# Altium schematic symbol library Inductor.SchLib: 326 symbols (part 1 of 7)
Pins are listed as number, name and electrical type; pins without a type are passive.

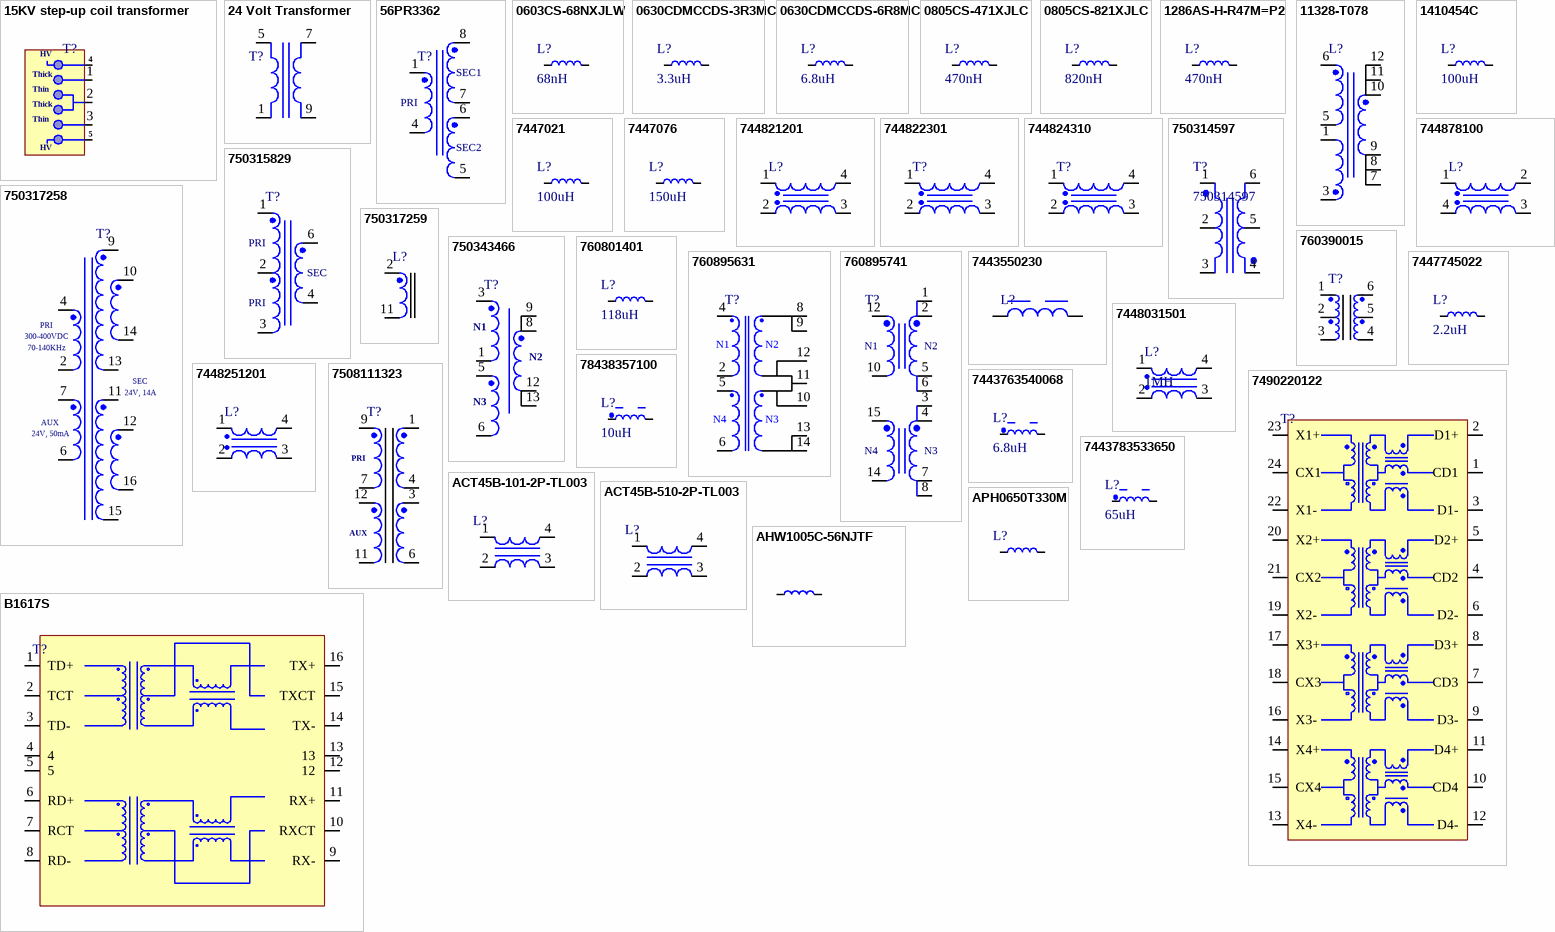
[diagram p0: symbols 15KV step-up coil transformer to B1617S]

## 15KV step-up coil transformer
designator T?
15KV Arc Ignition High Voltage Inverter Step Up Boost Coil Transformer Pulse Ignition 1.4x1.4x0.7cm Lighter Accessories; Manufacturer: Aideepen; Manufacturer Part Number: 15KV step-up coil transformer; Item Type: Transformer; ComponentLink1Description: Aliexpress; ComponentLink1URL: https://vi.aliexpress.com/item/1005006061113490.html
footprint 15KV step-up coil transformer
pins: 1, 2, 3
text: HV; 4; Thick; Thin; 5

## 24 Volt Transformer
designator T?
EI41 6W 6VA AC 220V To AC 9V 12V 18V 24V Mini Sealed Plug In PCB Board 4P 7P 9P 2+2 2+5 4+5 Pin Power Encapsulated Transformer; Manufacturer: Custom; Manufacturer Part Number: EI41 6W; Item Type: Tranformer; Package: Custom; ComponentLink1Description: LCSC; ComponentLink1URL: https://vi.aliexpress.com/item/1005004852504417.html?spm=a2g0o.detail.0.0.2e2bW50JW50JvB&gps-id=pcDetailTopMoreOtherSeller&scm=1007.40050.354490.0&scm_id=1007.40050.354490.0&scm-url=1007.40050.354490.0&pvid=b6bd52d8-3991-4a90-8d35-7ea6b531d3b9&_t=gps-id:pcDetailTopMoreOtherSeller,scm-url:1007.40050.354490.0,pvid:b6bd52d8-3991-4a90-8d35-7ea6b531d3b9,tpp_buckets:668%232846%238108%231977&pdp_npi=4%40dis%21USD%2110.00%219.2%21%21%2110.00%21%21%402101c71a16975406234165745e0bc7%2112000030749125505%21rec%21PK%214250221299%21AB
footprint 24 Volt Transformer
pins: 1, 5, 7, 9

## 56PR3362
designator T?
Gate Drive Transformer; Manufacturer: Vitec; Manufacturer Part Number: 56P3362; Package: Custom; LCSC Part Number: -; Item Type: Transformer; ComponentLink1Description: LCSC; ComponentLink1URL: *
footprint 56PR3362
pins: 1, 4, 5, 6, 7, 8
text: SEC1; PRI; SEC2

## 0603CS-68NXJLW
designator L?, comment 68nH
Ind Chip Wirewound 68nH 5% 200MHz 37Q-Factor Ceramic 600mA 0603; Manufacturer: Coilcraft; Manufacturer Part Number: 0603CS-68NXJLW; DC Resistance (DCR): 340mR; Q Factor: 21; Self Resonant Frequency: 1.7GHz; Item Type: Inductor; Supplier 1: Mouser; RoHS: Yes; Category: Fixed Inductors; Stock 1: 3257; Pricing 1: 1=0.96000, 10=0.95200, 50=0.95200, 100=0.95200, 1000=0.36200, 10000=0.30900 (USD); Case/Package: 0603; Weight: 7.1E-05oz; Core Material: Ceramic; Min Operating Temperature: -40°C; Max Operating Temperature: 125°C; Packaging: Tape and Reel; Tolerance: 5%; Inductance: 68nH; Max DC Current: 600mA; Termination: SMD/SMT; Test Frequency: 200MHz; Series: 0603CS; Length: 1.8mm; Width: 1.12mm; Height: 1.02mm; Lead Free: Contains Lead; RoHS Compliant: Yes; ComponentLink1URL: http://www.mouser.com/ds/2/597/0603cs-270694.pdf?src-supplier=Mouser; ComponentLink1Description: http://www.mouser.com/ds/2/597/0603cs-270694.pdf?src-supplier=Mouser; Supplier Part Number 1: 994-0603CS-68NXJLW
footprint IND-0603 (1608 Metric) (0.063" L x 0.032" W (1.60mm x 0.80mm))
pins: 1, 2

## 0630CDMCCDS-3R3MC
designator L?, comment 3.3uH
FIXED IND 3.3UH 8.4A 22MOHM SMD; Manufacturer: Sumida; Manufacturer Part Number: 0630CDMCCDS-3R3MC; Item Type: Inductor; Core Material: Metal; Saturation Current: 11.4A; Shielding: Shielded; DC Resistance (DCR): 22mR; Test Frequency: 100kHz; Tolerance: 20%; Supplier: Digikey; LCSC Part Number: C879414; RoHS: Yes; Stock: 66218; Pricing: 1=0.6, 10=0.51, 25=0.4632, 50=0.4354, 100=0.3614, 250=0.33356, 500=0.32624 (USD); Mounting Technology: Surface Mount; Case/Package: Nonstandard; Min Operating Temperature: -55°C; Max Operating Temperature: 125°C; Packaging: Tape and Reel; Value: 3.3uH; Current Rating: 8.4A; Series: 0630CDMC/DS; Length: 0.276inch; Width: 0.26inch; Height - Seated (Max): 0.118inch; RoHS Compliant: Yes; ComponentLink1URL: http://products.sumida.com/products/pdf/0630CDMCDDS.pdf?src-supplier=Digikey; ComponentLink1Description: http://products.sumida.com/products/pdf/0630CDMCDDS.pdf?src-supplier=Digikey; ComponentLink2URL: https://products.sumida.com/products/pdf/0630CDMCDDS.pdf?src-supplier=Digikey; ComponentLink2Description: https://products.sumida.com/products/pdf/0630CDMCDDS.pdf?src-supplier=Digikey; ComponentLink3URL: https://datasheet.octopart.com/0630CDMCCDS-3R3MC-Sumida-datasheet-111071315.pdf?src-supplier=Future+Electronics; ComponentLink3Description: https://datasheet.octopart.com/0630CDMCCDS-3R3MC-Sumida-datasheet-111071315.pdf?src-supplier=Future+Electronics
footprint 0630CDMCCDS-3R3MC
pins: 1, 2

## 0630CDMCCDS-6R8MC
designator L?, comment 6.8uH
FIXED IND 6.8UH 5A 48 MOHM SMD; Manufacturer: Sumida; Manufacturer Part Number: 0630CDMCCDS-6R8MC; Core Material: Metal; Saturation Current: 6.3A; Shielding: Shielded; DC Resistance (DCR): 48mR; Test Frequency: 100kHz; Tolerance: 20%; Item Type: Inductor; Supplier 1: Digi-Key; Stock 1: 1582; Pricing 1: 1=0.97, 10=0.845, 25=0.7848, 50=0.6642, 100=0.6038, 250=0.56752, 500=0.50716 (USD); Mount: Surface Mount; Case/Package: Nonstandard; Min Operating Temperature: -55°C; Max Operating Temperature: 125°C; Packaging: Tape and Reel; Inductance: 6.8uH; Current Rating: 5A; Length: 0.276inch; Width: 0.26inch; Height - Seated (Max): 0.118inch; RoHS Compliant: Yes; ComponentLink1URL: http://products.sumida.com/products/pdf/0630CDMCDDS.pdf?src-supplier=Digi-Key; ComponentLink1Description: http://products.sumida.com/products/pdf/0630CDMCDDS.pdf?src-supplier=Digi-Key; Supplier Part Number 1: 308-2467-1-ND; LCSC Part Number: C167295
footprint 0630CDMCCDS_6R8MC
pins: 1, 2

## 0805CS-471XJLC
designator L?, comment 470nH
Ind Chip Wirewound 470nH 5% 50MHz 33Q-Factor Ceramic 250mA 0805; Manufacturer: Coilcraft; Manufacturer Part Number: 0805CS-471XJLC; Self Resonant Frequency: 375MHz; Q Factor: 33; DC Resistance (DCR): 1.76R; Item Type: Inductor; Supplier 1: Mouser; RoHS: Yes; Category: Fixed Inductors; Stock 1: 13057; Pricing 1: 1=0.96000, 10=0.95200, 50=0.95200, 100=0.95200, 1000=0.36200, 10000=0.30900 (USD); Case/Package: 0805; Weight: 0.000194oz; Core Material: Ceramic; Case Code (Imperial): 0805; Min Operating Temperature: -40°C; Max Operating Temperature: 125°C; Tolerance: 5%; Packaging: Tape and Reel; Inductance: 470nH; Max DC Current: 250mA; Termination: SMD/SMT; Test Frequency: 50MHz; Series: 0805CS; DC Current: 250mA; Length: 2.29mm; Width: 1.73mm; Height: 1.52mm; Depth: 1.73mm; Radiation Hardening: No; Lead Free: Contains Lead; RoHS Compliant: Yes; Military Standard: Not; ComponentLink1URL: https://www.verical.com/server-webapp/html/getDatasheet?partID=491697&src-supplier=Verical; ComponentLink1Description: https://www.verical.com/server-webapp/html/getDatasheet?partID=491697&src-supplier=Verical; ComponentLink2URL: http://www.mouser.com/ds/2/597/0805cs-270614.pdf?src-supplier=Mouser; ComponentLink2Description: http://www.mouser.com/ds/2/597/0805cs-270614.pdf?src-supplier=Mouser; Supplier Part Number 1: 994-0805CS-471XJLC
footprint Ind-0805 (Inductor 0805)
pins: 1, 2

## 0805CS-821XJLC
designator L?, comment 820nH
Ind Chip Wirewound 820nH 5% 25MHz 23Q-Factor Ceramic 180mA 0805; Manufacturer: Coilcraft; Manufacturer Part Number: 0805CS-821XJLC; Self Resonant Frequency: 310MHz; DC Resistance (DCR): 2.35R; Q Factor: 23; Item Type: Inductor; Supplier 1: Mouser; RoHS: Yes; Category: Fixed Inductors; Stock 1: 7834; Pricing 1: 1=0.96000, 10=0.95200, 50=0.95200, 100=0.95200, 200=0.71100, 500=0.53000, 1000=0.36200, 2000=0.30900, 10000=0.30900 (USD); Case/Package: 0805; Core Material: Ceramic; Weight: 0.000194oz; Min Operating Temperature: -40°C; Max Operating Temperature: 125°C; Packaging: Tape and Reel; Tolerance: 5%; Inductance: 820nH; Max DC Current: 180mA; Termination: SMD/SMT; Test Frequency: 25MHz; Series: 0805CS; Length: 2.29mm; Width: 1.73mm; Height: 1.52mm; Lead Free: Contains Lead; RoHS Compliant: Yes; ComponentLink1URL: http://www.mouser.com/ds/2/597/0805cs-270614.pdf?src-supplier=Mouser; ComponentLink1Description: http://www.mouser.com/ds/2/597/0805cs-270614.pdf?src-supplier=Mouser; Supplier Part Number 1: 994-0805CS-821XJLC
footprint Ind-0805 (Inductor 0805)
pins: 1, 2

## 1286AS-H-R47M=P2
designator L?, comment 470nH
FIXED IND 470NH 3.4A 52 MOHM SMD; Manufacturer: Murata; Manufacturer Part Number: 1286AS-H-R47M=P2; Core Material: Ferrite; Shielding: Shielded; DC Resistance (DCR): 52mR; Test Frequency: 1MHz; Max DC Current: 3.8A; Tolerance: 20%; Item Type: Inductor; Supplier: Digi-Key; Supplier Part Number: 490-10606-1-ND; RoHS: Yes; Category: Fixed Inductors; Stock: 12493; Pricing: 1=0.39, 10=0.348, 25=0.3048, 50=0.2612, 100=0.2394, 250=0.21764, 500=0.2046, 1000=0.15671 (USD); Mounting Technology: Surface Mount; Case/Package: 0806; Case Code (Metric): 2016; Case Code (Imperial): 0806; Min Operating Temperature: -40°C; Max Operating Temperature: 85°C; Value: 470nH; Packaging: Cut Tape; Current Rating: 3.4A; Series: DFE201612C; Length: 0.079inch; Width: 0.063inch; Height - Seated (Max): 0.047inch; Depth: 1.6mm; RoHS Compliant: Yes; ComponentLink1URL: http://www.farnell.com/datasheets/2021974.pdf?src-supplier=Farnell; ComponentLink1Description: http://www.farnell.com/datasheets/2021974.pdf?src-supplier=Farnell; ComponentLink2URL: http://www.toko.co.jp/products/pdf/inductors/dfe201612c.pdf?src-supplier=Avnet; ComponentLink2Description: http://www.toko.co.jp/products/pdf/inductors/dfe201612c.pdf?src-supplier=Avnet; ComponentLink3URL: http://search.murata.co.jp/Ceramy/image/img/P02/J(E)TE243A-0010_DFE201612C_reference.pdf?src-supplier=Digi-Key; ComponentLink3Description: http://search.murata.co.jp/Ceramy/image/img/P02/J(E)TE243A-0010_DFE201612C_reference.pdf?src-supplier=Digi-Key; ComponentLink4URL: http://www.toko.co.jp/products/pdf/inductors/dfe201612c.pdf?src-supplier=Digi-Key; ComponentLink4Description: http://www.toko.co.jp/products/pdf/inductors/dfe201612c.pdf?src-supplier=Digi-Key; LCSC Part Number: C160957
footprint IND-0806
pins: 1, 2

## 11328-T078
designator L?
Power Transformers Flyback Transformer for LT8316; Manufacturer: Sumida; Manufacturer Part Number: 11328-T078; Supplier: Mouser; Supplier Part Number: 851-11328-T078; RoHS: Yes; Item Type: Transformer; Pricing: 1=8.39, 10=6.59, 50=6.41, 100=5.22, 1000=5.02, 10000=4.94 (USD)
footprint 11328-T078
pins: 1, 3, 5, 6, 7, 8, 9, 10, 11, 12

## 1410454C
designator L?, comment 100uH
FIXED IND 100UH 5.4A 46 MOHM TH; Manufacturer: Murata; Manufacturer Part Number: 1410454C; Item Type: Fixed Inductor; Supplier: Digikey; Supplier Part Number: 811-1345-ND; RoHS: Yes; Stock: 662; Pricing: 1=2.49, 5=2.48, 10=2.46, 25=2.44, 50=2.38, 100=2.26, 250=2.11, 500=1.96, 1000=1.85001 (USD); ComponentLink1URL: https://datasheet.ciiva.com/1054/kmp-1400-1054704.pdf?src-supplier=Digikey; ComponentLink1Description: https://datasheet.ciiva.com/1054/kmp-1400-1054704.pdf?src-supplier=Digikey; ComponentLink2URL: https://datasheet.ciiva.com/8035/1697186-8035695.pdf?src-supplier=Element14; ComponentLink2Description: https://datasheet.ciiva.com/8035/1697186-8035695.pdf?src-supplier=Element14; ComponentLink3URL: https://datasheet.ciiva.com/1128/1697186-1128025.pdf?src-supplier=Element14; ComponentLink3Description: https://datasheet.ciiva.com/1128/1697186-1128025.pdf?src-supplier=Element14; ComponentLink4URL: https://datasheet.ciiva.com/3077/kmp-1400-3077038.pdf?src-supplier=Avnet; ComponentLink4Description: https://datasheet.ciiva.com/3077/kmp-1400-3077038.pdf?src-supplier=Avnet; ComponentLink5URL: https://datasheet.ciiva.com/4957/kmp-1400-38440-4957718.pdf?src-supplier=Mouser; ComponentLink5Description: https://datasheet.ciiva.com/4957/kmp-1400-38440-4957718.pdf?src-supplier=Mouser
footprint 1410454C
pins: 1, 2

## 7447021
designator L?, comment 100uH
FIXED IND 100UH 2A 80 MOHM TH; Manufacturer: Wurth Electronics; Manufacturer Part Number: 7447021; Item Type: Inductors; Supplier: Mouser; Supplier Part Number: 710-7447021; RoHS: Yes; Stock: 1392; Pricing: 1=1.93, 10=1.83, 50=1.71, 100=1.61, 1000=1.46, 10000=1.46 (USD); ComponentLink1URL: https://datasheet.ciiva.com/11796/0900766b804e2e89-11796539.pdf?src-supplier=Rs; ComponentLink1Description: https://datasheet.ciiva.com/11796/0900766b804e2e89-11796539.pdf?src-supplier=Rs; ComponentLink2URL: https://datasheet.ciiva.com/6693/7447021-6693538.pdf?src-supplier=Digikey; ComponentLink2Description: https://datasheet.ciiva.com/6693/7447021-6693538.pdf?src-supplier=Digikey; ComponentLink3URL: https://datasheet.ciiva.com/14101/pk7447021-data-de-14101850.pdf?src-supplier=Distrelec; ComponentLink3Description: https://datasheet.ciiva.com/14101/pk7447021-data-de-14101850.pdf?src-supplier=Distrelec; ComponentLink4URL: https://datasheet.ciiva.com/7695/7447021-7695676.pdf?src-supplier=Element14; ComponentLink4Description: https://datasheet.ciiva.com/7695/7447021-7695676.pdf?src-supplier=Element14; ComponentLink5URL: https://datasheet.ciiva.com/48691/001087627-da-01-ml-we-fi-funkentstoerdrossel-7447021-de-en-48691575.pdf?src-supplier=Conrad; ComponentLink5Description: https://datasheet.ciiva.com/48691/001087627-da-01-ml-we-fi-funkentstoerdrossel-7447021-de-en-48691575.pdf?src-supplier=Conrad
footprint 7447021
pins: 1, 2

## 7447076
designator L?, comment 150uH
FIXED IND 150UH 5A 45 MOHM TH; Manufacturer: Wurth Electronics; Manufacturer Part Number: 7447076; Item Type: Inductors; Supplier: Mouser; RoHS: Yes; Stock: 602; Pricing: 1=5.45, 10=5.19, 50=4.84, 100=4.57, 1000=4.12, 10000=4.12 (USD); ComponentLink1URL: https://datasheet.ciiva.com/11796/0900766b804e2e81-11796524.pdf?src-supplier=Rs; ComponentLink1Description: https://datasheet.ciiva.com/11796/0900766b804e2e81-11796524.pdf?src-supplier=Rs; ComponentLink2URL: https://datasheet.ciiva.com/6697/7447076-6697107.pdf?src-supplier=Digikey; ComponentLink2Description: https://datasheet.ciiva.com/6697/7447076-6697107.pdf?src-supplier=Digikey; ComponentLink3URL: https://datasheet.ciiva.com/7695/7447076-7695687.pdf?src-supplier=Element14; ComponentLink3Description: https://datasheet.ciiva.com/7695/7447076-7695687.pdf?src-supplier=Element14; Supplier Part Number: 710-7447076
footprint 7447076
pins: 1, 2

## 744821201
designator L?
CMC 1MH 2A 2LN TH; Manufacturer: Wurth Electronics; Manufacturer Part Number: 744821201; Item Type: Fixed Inductors; Supplier: Mouser; Supplier Part Number: 710-744821201; RoHS: Yes; Stock: 341; Pricing: 1=3.6, 10=3.33, 50=2.98, 100=2.62, 1000=2.34, 10000=2.34 (USD); ComponentLink1URL: https://datasheet.ciiva.com/4952/744821201-87450-4952378.pdf?src-supplier=Mouser; ComponentLink1Description: https://datasheet.ciiva.com/4952/744821201-87450-4952378.pdf?src-supplier=Mouser; ComponentLink2URL: https://datasheet.ciiva.com/1008/744821201-1008592.pdf?src-supplier=Digikey; ComponentLink2Description: https://datasheet.ciiva.com/1008/744821201-1008592.pdf?src-supplier=Digikey; ComponentLink3URL: https://datasheet.ciiva.com/11796/0900766b804ac268-11796620.pdf?src-supplier=Rs; ComponentLink3Description: https://datasheet.ciiva.com/11796/0900766b804ac268-11796620.pdf?src-supplier=Rs; ComponentLink4URL: https://datasheet.ciiva.com/7211/70377-7211245.pdf?src-supplier=Newark; ComponentLink4Description: https://datasheet.ciiva.com/7211/70377-7211245.pdf?src-supplier=Newark; ComponentLink5URL: https://datasheet.ciiva.com/7892/1736513-7892972.pdf?src-supplier=Element14; ComponentLink5Description: https://datasheet.ciiva.com/7892/1736513-7892972.pdf?src-supplier=Element14; ComponentLink6URL: https://datasheet.ciiva.com/14124/to744821201-data-de-14124987.pdf?src-supplier=Distrelec; ComponentLink6Description: https://datasheet.ciiva.com/14124/to744821201-data-de-14124987.pdf?src-supplier=Distrelec
footprint 744821201
pins: 1, 2, 3, 4

## 744822301
designator T?
CMC 1MH 3A 2LN TH; Manufacturer: Wurth Electronics; Manufacturer Part Number: 744822301; Item Type: Inductor; Supplier: Digikey; Supplier Part Number: 732-1439-ND; RoHS: Yes; Stock: 1589; Pricing: 1=4.57, 10=4.5, 50=3.57, 140=3.41, 280=3.1 (USD); ComponentLink1URL: https://datasheet.ciiva.com/4952/744822301-91864-4952415.pdf?src-supplier=Mouser; ComponentLink1Description: https://datasheet.ciiva.com/4952/744822301-91864-4952415.pdf?src-supplier=Mouser; ComponentLink2URL: https://datasheet.ciiva.com/11796/0900766b804ac271-11796688.pdf?src-supplier=Rs; ComponentLink2Description: https://datasheet.ciiva.com/11796/0900766b804ac271-11796688.pdf?src-supplier=Rs; ComponentLink3URL: https://datasheet.ciiva.com/7211/70388-7211253.pdf?src-supplier=Newark; ComponentLink3Description: https://datasheet.ciiva.com/7211/70388-7211253.pdf?src-supplier=Newark; ComponentLink4URL: https://datasheet.ciiva.com/7754/1736520-7754735.pdf?src-supplier=Element14; ComponentLink4Description: https://datasheet.ciiva.com/7754/1736520-7754735.pdf?src-supplier=Element14; ComponentLink5URL: https://datasheet.ciiva.com/6216/744822301-6216281.pdf?src-supplier=Digikey; ComponentLink5Description: https://datasheet.ciiva.com/6216/744822301-6216281.pdf?src-supplier=Digikey
footprint 744822301
pins: 1, 2, 3, 4

## 744824310
designator T?
CMC 10MH 3A 2LN TH; Manufacturer: Wurth Electronics; Manufacturer Part Number: 744824310; Item Type: Common Mode Chokes; Tolerance: 30%; Test Frequency: 10kHz; Number of Lines: 2; DC Resistance (DCR): 105mR; Supplier: Digikey; Supplier Part Number: 732-1452-ND; RoHS: Yes; Stock: 278; Pricing: 1=5.63, 10=5.54, 100=4.39, 250=4.2, 500=3.82 (USD); Mounting Technology: Through Hole,Radial; Case/Package: L; Pins: 4; Min Operating Temperature: -40°C; Max Operating Temperature: 125°C; Current Rating: 3A; Packaging: Bulk; Value: 10mH; Max DC Current: 3A; Termination: Radial; Series: WE-CMB; Inductance Tolerance: 30%; Package Quantity: 200; Current: 3A; Length: 27.5mm; Width: 18.5mm; Height: 33mm; Lead Pitch: 10mm; Depth: 18.5mm; Reach SVHC Compliant: No; RoHS Compliant: Yes; Lead Free: Lead Free; ComponentLink1URL: https://datasheet.ciiva.com/11796/0900766b804acf58-11796710.pdf?src-supplier=Rs; ComponentLink1Description: https://datasheet.ciiva.com/11796/0900766b804acf58-11796710.pdf?src-supplier=Rs; ComponentLink2URL: https://datasheet.ciiva.com/4952/744824310-39306-4952431.pdf?src-supplier=Mouser; ComponentLink2Description: https://datasheet.ciiva.com/4952/744824310-39306-4952431.pdf?src-supplier=Mouser; ComponentLink3URL: https://datasheet.ciiva.com/6214/744824310-6214810.pdf?src-supplier=Digikey; ComponentLink3Description: https://datasheet.ciiva.com/6214/744824310-6214810.pdf?src-supplier=Digikey; ComponentLink4URL: https://datasheet.ciiva.com/7211/70411-7211262.pdf?src-supplier=Newark; ComponentLink4Description: https://datasheet.ciiva.com/7211/70411-7211262.pdf?src-supplier=Newark; ComponentLink5URL: https://datasheet.ciiva.com/7754/1736534-7754741.pdf?src-supplier=Element14; ComponentLink5Description: https://datasheet.ciiva.com/7754/1736534-7754741.pdf?src-supplier=Element14; ComponentLink6URL: https://datasheet.ciiva.com/48690/001088035-da-01-ml-we-cmb-stromkomp-netzdrossel-74482-de-en-48690603.pdf?src-supplier=Conrad; ComponentLink6Description: https://datasheet.ciiva.com/48690/001088035-da-01-ml-we-cmb-stromkomp-netzdrossel-74482-de-en-48690603.pdf?src-supplier=Conrad
footprint 744824310
pins: 1, 2, 3, 4

## 744878100
designator L?
INDUCT ARRAY 2 COIL 10UH SMD; Manufacturer: Wurth Electronics; Manufacturer Part Number: 744878100; Item Type: Inductors; Core Material: Ferrite; Inductance Tolerance: 20%; Self Resonant Frequency: 30MHz; Voltage Rating (DC): 80V; Value: 10H; Shielding: Shielded; Number of Coils: 2; DC Resistance (DCR) - Parallel: 150mR; Max DC Current: 1A; Inductance - Series: 40uH; Supplier: Digikey; Supplier Part Number: 732-2304-1-ND; RoHS: Yes; Stock: 7740; Pricing: 1=2.53, 10=2.41, 50=2.24, 100=2.06, 500=1.89 (USD); Mounting Technology: Surface Mount; Case/Package: Nonstandard; Pins: 4; Min Operating Temperature: -40°C; Max Operating Temperature: 125°C; Package Quantity: 1; Tolerance: 20%; Packaging: Tape and Reel; Termination: SMD/SMT; RMS Current (Irms): 1A; Inductance - Parallel: 10uH; Series: WE-DD; Length: 7.3mm; Width: 7.3mm; Height: 4mm; Depth: 7.3mm; Lead Free: Lead Free; RoHS Compliant: Yes; Reach SVHC Compliant: Unknown; ComponentLink1URL: https://datasheet.ciiva.com/6171/1243322-6171216.pdf?src-supplier=Farnell; ComponentLink1Description: https://datasheet.ciiva.com/6171/1243322-6171216.pdf?src-supplier=Farnell; ComponentLink2URL: https://datasheet.ciiva.com/4954/744878100-47110-4954758.pdf?src-supplier=Mouser; ComponentLink2Description: https://datasheet.ciiva.com/4954/744878100-47110-4954758.pdf?src-supplier=Mouser; ComponentLink3URL: https://datasheet.ciiva.com/1036/744878100-1036050.pdf?src-supplier=Digikey; ComponentLink3Description: https://datasheet.ciiva.com/1036/744878100-1036050.pdf?src-supplier=Digikey; ComponentLink4URL: https://datasheet.ciiva.com/11803/0900766b80fecf13-11803188.pdf?src-supplier=Rs; ComponentLink4Description: https://datasheet.ciiva.com/11803/0900766b80fecf13-11803188.pdf?src-supplier=Rs; ComponentLink5URL: https://datasheet.ciiva.com/1036/744878100-1036051.pdf?src-supplier=Digikey; ComponentLink5Description: https://datasheet.ciiva.com/1036/744878100-1036051.pdf?src-supplier=Digikey; ComponentLink6URL: https://datasheet.ciiva.com/1036/744878100-1036052.pdf?src-supplier=Digikey; ComponentLink6Description: https://datasheet.ciiva.com/1036/744878100-1036052.pdf?src-supplier=Digikey
footprint 744878100
pins: 1, 2, 3, 4

## 750314597
designator T?
XFRMR ISOL BUCK DC/DC CONV SMD; Manufacturer: Wurth Electronics Midcom; Frequency: 150kHz; Supplier 1: Digi-Key; Manufacturer Part Number: 750314597; RoHS: Yes; Category: Power Supply Modules; Stock 1: 1132; Pricing 1: 1=3.57000, 10=3.30600, 50=3.00500, 100=2.73200 (USD); Mount: Surface Mount; Min Operating Temperature: -40°C; Max Operating Temperature: 125°C; Packaging: Tape and Reel; RoHS Compliant: No; ComponentLink1URL: http://www.mouser.com/ds/2/445/750314597-773587.pdf?src-supplier=Mouser; ComponentLink1Description: http://www.mouser.com/ds/2/445/750314597-773587.pdf?src-supplier=Mouser; ComponentLink2URL: https://katalog.we-online.de/ctm/datasheet/750314597.pdf?src-supplier=Digi-Key; ComponentLink2Description: https://katalog.we-online.de/ctm/datasheet/750314597.pdf?src-supplier=Digi-Key; Supplier Part Number 1: 1297-1165-1-ND
footprint 750314597
pins: 1 PRI_1, 2 NC, 3 PRI_2, 4 SEC_1, 5 NC, 6 SEC_2

## 750315829
designator T?
MID-FLYLT LT8303 150uH 3.1W Power Transformers; Manufacturer: Wurth Electronics; Manufacturer Part Number: 750315829; Frequency: 200kHz; Supplier: Digikey; RoHS: Yes; Item Type: Transformer; Stock: 1323; Pricing: 1=2.66, 10=2.131, 25=1.7312, 50=1.6868, 100=1.6424 (USD); Mounting Technology: Surface Mount; Min Operating Temperature: -40°C; Max Operating Temperature: 125°C; Packaging: Cut Tape; Series: *; RoHS Compliant: Yes; ComponentLink1URL: https://katalog.we-online.com/ctm/datasheet/750315829.pdf?src-supplier=Digikey; ComponentLink1Description: https://katalog.we-online.com/ctm/datasheet/750315829.pdf?src-supplier=Digikey
footprint 750315829
pins: 1, 2, 3, 4, 6
text: PRI; SEC

## 750317258
designator T?
Manufacturer: Würth Elektronik; Manufacturer Part Number: 750317258; Item Type: Transformer; Package: Custom; LCSC Part Number: -; ComponentLink1Description: LCSC; ComponentLink1URL: *
footprint 750317258
pins: 2, 4, 6, 7, 9, 10, 11, 12, 13, 14, 15, 16
text: PRI; 300-400VDC; 70-140KHz; SEC; 24V, 14A; AUX; 24V, 50mA

## 750317259
designator L?
Manufacturer: Würth Elektronik; Manufacturer Part Number: 750317259; Item Type: Inductor; Package: Custom; LCSC Part Number: -; ComponentLink1Description: LCSC; ComponentLink1URL: *
footprint 750317259 (SMD, 12-Leads, Body 31.75x31.75mm)
pins: 2, 11

## 750343466
designator T?
XFMR FLYBACK AC/DC CONV 280UH TH; Manufacturer: Wurth Electronics; Manufacturer Part Number: 750343466; Item Type: Transformer; Supplier: Digikey; Supplier Part Number: 1297-750343466-ND; RoHS: Yes; Stock: 112; Pricing: 1=7.36, 10=6.646, 25=6.3768, 70=6.08471, 140=5.89457, 280=5.70964, 490=5.56402, 980=5.38821 (USD); RoHS Compliant: Yes
footprint 750343466
pins: 1, 3, 5, 6, 8, 9, 12, 13
text: N1; N2; N3

## 760390015
designator T?
TRANSFORMER 475UH SMD; Manufacturer: Wurth Electronics; Manufacturer Part Number: 760390015; Frequency: 10kHz; Current Rating: 150mA; Isolation Voltage: 2.5kV; Supplier: Rs; Supplier Part Number: 1828986P; RoHS: Yes; Category: Transformers; Stock: 435; Pricing: 25=1.438, 100=1.36, 250=1.312, 500=1.226 (GBP); Mounting Technology: Surface Mount; Case/Package: SMD/SMT; Min Operating Temperature: -40°C; Max Operating Temperature: 125°C; Package Quantity: 1; Packaging: Tape and Reel; Termination: SMD/SMT; Value: 475uH; Series: WE-PP; Max DC Current: 150mA; Length: 10.05mm; Width: 10.05mm; Height: 4.19mm; Height - Seated (Max): 4.19mm; RoHS Compliant: Yes; ComponentLink1URL: https://datasheet.ciiva.com/12335/760390015-221218-12335392.pdf?src-supplier=Mouser; ComponentLink1Description: https://datasheet.ciiva.com/12335/760390015-221218-12335392.pdf?src-supplier=Mouser; Item Type: TRANSFORMER
footprint 760390015
pins: 1, 2, 3, 4, 5, 6

## 760801401
designator L?, comment 118uH
FIXED IND 118UH 13.9A 0.022OHM; Manufacturer: Wurth Electronics; Manufacturer Part Number: 760801401; Item Type: Inductors; Supplier: Digikey; Supplier Part Number: 732-760801401-ND; RoHS: No; Stock: 36; Pricing: 1=18.9, 5=17.01, 10=15.12, 20=14.175, 100=13.2301 (USD)
footprint 760801401
pins: 1, 2

## 760895631
designator T?
XFMR RES CONV AC/DC 500UH TH; Manufacturer: Wurth Electronics; Manufacturer Part Number: 760895631; Item Type: Transformer; Current Rating: 16.7A; Power Rating: 200W; Shielding: Unshielded; Frequency: 120kHz; Output Voltage: 12V; Supplier: Digikey; Supplier Part Number: 732-5065-ND; RoHS: Yes; Stock: 19; Pricing: 1=18.84, 10=18.057, 50=16.928, 100=15.235, 500=13.54202 (USD); Mounting Technology: Through Hole; Min Operating Temperature: -40°C; Max Operating Temperature: 125°C; Package Quantity: 15; Output Current: 16.7A; Termination: Solder; Value: 500uH; Packaging: Tray; Series: WE-LLCR; Length: 44mm; Width: 36mm; Height: 30mm; RoHS Compliant: Yes; ComponentLink1URL: https://datasheet.ciiva.com/24142/760895631-270540-24142135.pdf?src-supplier=Mouser; ComponentLink1Description: https://datasheet.ciiva.com/24142/760895631-270540-24142135.pdf?src-supplier=Mouser; ComponentLink2URL: https://datasheet.ciiva.com/29632/760895631-29632478.pdf?src-supplier=Digikey; ComponentLink2Description: https://datasheet.ciiva.com/29632/760895631-29632478.pdf?src-supplier=Digikey
footprint 760895631
pins: 2, 4, 5, 6, 8, 9, 10, 11, 12, 13, 14
text: N1; N2; N4; N3

## 760895741
designator T?
XFMR RES CONV AC/DC 400UH TH; Manufacturer: Wurth Electronics; Manufacturer Part Number: 760895741; Item Type: Transformer; Frequency: 120kHz; Current Rating: 10.4A; Power Rating: 250W; Shielding: Unshielded; Output Voltage: 24V; Supplier: Digikey; Supplier Part Number: 732-5069-ND; RoHS: Yes; Stock: 7; Pricing: 1=22.74, 10=21.792, 50=20.43, 100=18.3881, 500=15.66304 (USD); Mounting Technology: Through Hole; Min Operating Temperature: -40°C; Max Operating Temperature: 125°C; Package Quantity: 20; Output Current: 10.4A; Packaging: Tray; Termination: Solder; Value: 400uH; Series: WE-LLCR; Length: 48mm; Width: 35mm; Height: 27.5mm; RoHS Compliant: Yes; ComponentLink1URL: https://datasheet.ciiva.com/24142/760895741-270531-24142074.pdf?src-supplier=Mouser; ComponentLink1Description: https://datasheet.ciiva.com/24142/760895741-270531-24142074.pdf?src-supplier=Mouser; ComponentLink2URL: https://datasheet.ciiva.com/29632/760895741-29632482.pdf?src-supplier=Digikey; ComponentLink2Description: https://datasheet.ciiva.com/29632/760895741-29632482.pdf?src-supplier=Digikey
footprint 760895741
pins: 1, 2, 3, 4, 5, 6, 7, 8, 10, 12, 14, 15
text: N1; N2; N4; N3

## 7443550230
designator L?
FIXED IND 2.3UH 17.5A 3.7MOHM SM; Manufacturer: Wurth Electronics; Manufacturer Part Number: 7443550230; Item Type: Inductors; Supplier: Digikey; Supplier Part Number: 732-7443550230CT-ND; RoHS: Yes; Stock: 2613; Pricing: 1=3.48, 10=3.41, 50=3.15, 100=3.02, 200=2.82 (USD); ComponentLink1URL: https://datasheet.ciiva.com/4954/7443550230-82185-4954542.pdf?src-supplier=Mouser; ComponentLink1Description: https://datasheet.ciiva.com/4954/7443550230-82185-4954542.pdf?src-supplier=Mouser; ComponentLink2URL: https://datasheet.ciiva.com/11801/0900766b80f886e1-11801808.pdf?src-supplier=Rs; ComponentLink2Description: https://datasheet.ciiva.com/11801/0900766b80f886e1-11801808.pdf?src-supplier=Rs; ComponentLink3URL: https://datasheet.ciiva.com/7765/1735881-7765096.pdf?src-supplier=Element14; ComponentLink3Description: https://datasheet.ciiva.com/7765/1735881-7765096.pdf?src-supplier=Element14; ComponentLink4URL: https://datasheet.ciiva.com/6705/7443550230-6705035.pdf?src-supplier=Digikey; ComponentLink4Description: https://datasheet.ciiva.com/6705/7443550230-6705035.pdf?src-supplier=Digikey; ComponentLink5URL: https://datasheet.ciiva.com/6705/7443550230-6705036.pdf?src-supplier=Digikey; ComponentLink5Description: https://datasheet.ciiva.com/6705/7443550230-6705036.pdf?src-supplier=Digikey
footprint 7443550230
pins: 1, 2

## 7447745022
designator L?, comment 2.2uH
FIXED IND 2.2UH 3.6A 36 MOHM SMD; Manufacturer: Wurth Electronics; Manufacturer Part Number: 7447745022; Item Type: Inductors; Supplier: Digikey; RoHS: Yes; Stock: 1399; Pricing: 1=1.87, 10=1.791, 50=1.612, 100=1.492, 500=1.433, 1000=1.313 (USD); ComponentLink1URL: https://datasheet.ciiva.com/4954/7447745022-70534-4954819.pdf?src-supplier=Mouser; ComponentLink1Description: https://datasheet.ciiva.com/4954/7447745022-70534-4954819.pdf?src-supplier=Mouser; ComponentLink2URL: https://datasheet.ciiva.com/30489/0900766b811bf6b7-30489497.pdf?src-supplier=Rs; ComponentLink2Description: https://datasheet.ciiva.com/30489/0900766b811bf6b7-30489497.pdf?src-supplier=Rs; ComponentLink3URL: https://datasheet.ciiva.com/7892/1736408-7892891.pdf?src-supplier=Element14; ComponentLink3Description: https://datasheet.ciiva.com/7892/1736408-7892891.pdf?src-supplier=Element14; ComponentLink4URL: https://datasheet.ciiva.com/6700/7447745022-6700388.pdf?src-supplier=Digikey; ComponentLink4Description: https://datasheet.ciiva.com/6700/7447745022-6700388.pdf?src-supplier=Digikey; ComponentLink5URL: https://datasheet.ciiva.com/6700/7447745022-6700390.pdf?src-supplier=Digikey; ComponentLink5Description: https://datasheet.ciiva.com/6700/7447745022-6700390.pdf?src-supplier=Digikey
footprint 7447745022
pins: 1, 2

## 7448031501
designator L?, comment 1MH
CMC 1MH 15A 2LN TH; Manufacturer: Wurth Electronics; Manufacturer Part Number: 7448031501; Number of Lines: 2; Voltage Rating (AC): 250V; Shielding: Unshielded; Tolerance: 50%; Test Frequency: 10kHz; Item Type: Inductor; Supplier: Mouser; Supplier Part Number: 710-7448031501; RoHS: Yes; Category: Common Mode Chokes; Stock: 2629; Pricing: 1=12.9, 10=12.9, 50=11.34, 100=9.67, 1000=8.72, 10000=8.72 (USD); Mounting Technology: Through Hole; Case/Package: 300; Min Operating Temperature: -40°C; Max Operating Temperature: 125°C; Current Rating: 15A; Package Quantity: 90; Packaging: Bulk; Max Current Rating: 15A; Value: 1mH; Termination: Through Hole; Max DC Current: 15A; Series: WE-CMBNC; Length: 23mm; Width: 17mm; Height: 25mm; RoHS Compliant: Yes; Reach SVHC Compliant: Unknown; ComponentLink1URL: https://datasheet.ciiva.com/46423/1832949-46423388.pdf?src-supplier=Element14; ComponentLink1Description: https://datasheet.ciiva.com/46423/1832949-46423388.pdf?src-supplier=Element14
footprint 7448031501
pins: 1, 2, 3, 4

## 7448251201
designator L?
CMC 1MH 12A 2LN TH; Manufacturer: Wurth Electronics; Manufacturer Part Number: 7448251201; Item Type: Inductors; Supplier: Digikey; Supplier Part Number: 732-1454-ND; RoHS: Yes; Stock: 1202; Pricing: 1=6.33, 10=6.23, 50=4.94, 175=4.73006, 350=4.6368 (USD); ComponentLink1URL: https://datasheet.ciiva.com/6216/7448251201-6216302.pdf?src-supplier=Digikey; ComponentLink1Description: https://datasheet.ciiva.com/6216/7448251201-6216302.pdf?src-supplier=Digikey; ComponentLink2URL: https://datasheet.ciiva.com/4952/7448251201-46375-4952324.pdf?src-supplier=Mouser; ComponentLink2Description: https://datasheet.ciiva.com/4952/7448251201-46375-4952324.pdf?src-supplier=Mouser; ComponentLink3URL: https://datasheet.ciiva.com/11796/0900766b804acf5b-11796661.pdf?src-supplier=Rs; ComponentLink3Description: https://datasheet.ciiva.com/11796/0900766b804acf5b-11796661.pdf?src-supplier=Rs; ComponentLink4URL: https://datasheet.ciiva.com/7754/1736539-7754744.pdf?src-supplier=Element14; ComponentLink4Description: https://datasheet.ciiva.com/7754/1736539-7754744.pdf?src-supplier=Element14; ComponentLink5URL: https://datasheet.ciiva.com/7211/70416-7211268.pdf?src-supplier=Newark; ComponentLink5Description: https://datasheet.ciiva.com/7211/70416-7211268.pdf?src-supplier=Newark; ComponentLink6URL: https://datasheet.ciiva.com/14124/ue7448251201-de-14124967.pdf?src-supplier=Distrelec; ComponentLink6Description: https://datasheet.ciiva.com/14124/ue7448251201-de-14124967.pdf?src-supplier=Distrelec
footprint 7448251201
pins: 1, 2, 3, 4

## 7490220122
designator T?
PULSE XFMR 1CT:1CT TX 1CT:1CT RX; Manufacturer: Wurth Electronics; Manufacturer Part Number: 7490220122; Item Type: Transformers; Value: 350uH; Turns Ratio: 1:1; Supplier: Digikey; Supplier Part Number: 732-10731-1-ND; RoHS: Yes; Stock: 1691; Pricing: 1=6.97, 10=6.731, 50=6.321, 100=5.951 (USD); Mounting Technology: Surface Mount; Min Operating Temperature: -40°C; Max Operating Temperature: 85°C; Packaging: Cut Tape; Series: WE-LAN; RoHS Compliant: Yes; ComponentLink1URL: http://www.farnell.com/datasheets/2616617.pdf?src-supplier=Farnell; ComponentLink1Description: http://www.farnell.com/datasheets/2616617.pdf?src-supplier=Farnell; ComponentLink2URL: http://www.farnell.com/datasheets/2616617.pdf?src-supplier=Newark; ComponentLink2Description: http://www.farnell.com/datasheets/2616617.pdf?src-supplier=Newark; ComponentLink3URL: https://katalog.we-online.de/pbs/datasheet/7490220122.pdf?src-supplier=Digikey; ComponentLink3Description: https://katalog.we-online.de/pbs/datasheet/7490220122.pdf?src-supplier=Digikey
footprint 7490220122
pins: 1 CD1, 2 D1+, 3 D1-, 4 CD2, 5 D2+, 6 D2-, 7 CD3, 8 D3+, 9 D3-, 10 CD4, 11 D4+, 12 D4-, 13 X4-, 14 X4+, 15 CX4, 16 X3-, 17 X3+, 18 CX3, 19 X2-, 20 X2+, 21 CX2, 22 X1-, 23 X1+, 24 CX1

## 7508111323
designator T?
XFMR FLYBACK AC/DC CONV 2MH TH; Manufacturer: Wurth Electronics; Manufacturer Part Number: 7508111323; Item Type: Transformer; Supplier: Digikey; Supplier Part Number: 732-7508111323CT-ND; RoHS: No; Stock: 130; Pricing: 1=6.34, 25=6.3092, 50=5.735 (USD)
footprint 7508111323
pins: 1, 3, 4, 6, 7, 9, 11, 12
text: PRI; AUX

## 78438357100
designator L?, comment 10uH
FIXED IND 10UH 2.7A 110MOHM SMD; Manufacturer: Wurth Elektronik; Manufacturer Part Number: 78438357100; Item Type: Fixed Inductors; DC Resistance (DCR): 100.8mΩ; Value: 10µH; Supplier: DigiKey; Supplier Part Number: 732-11746-1-ND; RoHS: Compliant; Stock: 6444; Pricing: 1=1.93, 10=1.893, 50=1.809, 100=1.667 (USD); Ambient Temperature Range High: 85°C; Ambient Temperature Range Low: -40°C; Current Rating: 2.7A; Height: 3mm; Length: 4mm; Max Operating Temperature: 125°C; Min Operating Temperature: -40°C; Width: 4mm; ComponentLink1URL: https://datasheet.octopart.com:443/78438357100-Wurth-Elektronik-datasheet-168498766.pdf?src-supplier=Wurth+Elektronik; ComponentLink1Description: https://datasheet.octopart.com:443/78438357100-Wurth-Elektronik-datasheet-168498766.pdf?src-supplier=Wurth+Elektronik
footprint 78438357100
pins: 1, 2

## 7443763540068
designator L?, comment 6.8uH
FIXED IND 6.8UH 56.7A 1.2MOHM TH; Manufacturer: Wurth Electronics; Manufacturer Part Number: 7443763540068; Item Type: Inductors; Supplier: Mouser; Supplier Part Number: 710-7443763540068; RoHS: No; Stock: 5; Pricing: 1=20.6, 10=18.63, 50=15.2, 100=15.2, 1000=15.2, 10000=15.2 (USD)
footprint 7443763540068
pins: 1, 2

## 7443783533650
designator L?, comment 65uH
FIXED IND 65UH 17.2A 14.44 MOHM; Manufacturer: Wurth Electronics; Manufacturer Part Number: 7443783533650; Item Type: Inductors; Core Material: Ferrite; Tolerance: 20%; Saturation Current: 26.6A; Shielding: Shielded; DC Resistance (DCR): 14.44mR; Self Resonant Frequency: 4.28MHz; Test Frequency: 100kHz; Supplier: Digikey; Supplier Part Number: 732-13654-ND; RoHS: No; Stock: 42; Pricing: 1=14.95, 3=13.64, 6=12.34, 9=11.04, 18=10.06 (USD); Mounting Technology: Through Hole; Case/Package: Nonstandard; Min Operating Temperature: -40°C; Max Operating Temperature: 125°C; Series: WE-HCFT; Value: 65uH
footprint 7443783533650
pins: 1, 2

## ACT45B-101-2P-TL003
designator L?
CMC 100UH 150MA 2LN 5.8KOHM SMD; Manufacturer: TDK; Manufacturer Part Number: ACT45B-101-2P-TL003; Core Material: Ferrite; Impedance: 5.8kR; Tolerance: 50%; DC Resistance (DCR): 3R; Voltage Rating (DC): 50V; Number of Lines: 2; Inductance Tolerance: -30%; Test Frequency: 10MHz; ESR: 2R; Item Type: Common Mode Filter; Supplier: Avnet; Supplier Part Number: ACT45B-101-2P-TL003; RoHS: Yes; Category: Common Mode Chokes; Stock: 12500; Pricing: 2500=1.0881 (USD); Mounting Technology: Surface Mount; Case/Package: 1812; Pins: 4; Case Code (Imperial): 1812; Weight: 0.000952oz; Min Operating Temperature: -40°C; Max Operating Temperature: 150°C; Value: 100uH; Packaging: Tape and Reel; Current Rating: 150mA; Max DC Current: 150mA; Voltage Rating: 50V; Termination: SMD/SMT; DC Current: 150mA; Series: ACT; Max Current Rating: 150mA; RMS Current (Irms): 150mA; Length: 4.7mm; Width: 3.2mm; Height: 3mm; Depth: 3.4mm; Ratings: AEC-Q200; Radiation Hardening: No; Reach SVHC Compliant: No; Lead Free: Lead Free; RoHS Compliant: Yes; ComponentLink1URL: https://datasheet.ciiva.com/22704/1833202-22704378.pdf?src-supplier=Element14; ComponentLink1Description: https://datasheet.ciiva.com/22704/1833202-22704378.pdf?src-supplier=Element14; ComponentLink2URL: https://datasheet.ciiva.com/16150/e9711-act-16150481.pdf?src-supplier=Onlinecomponents.com; ComponentLink2Description: https://datasheet.ciiva.com/16150/e9711-act-16150481.pdf?src-supplier=Onlinecomponents.com; ComponentLink3URL: https://datasheet.ciiva.com/26936/getdatasheetpartid-327023-26936433.pdf?src-supplier=Verical; ComponentLink3Description: https://datasheet.ciiva.com/26936/getdatasheetpartid-327023-26936433.pdf?src-supplier=Verical; ComponentLink4URL: https://datasheet.ciiva.com/1007/e9711-act-1007936.pdf?src-supplier=Digikey; ComponentLink4Description: https://datasheet.ciiva.com/1007/e9711-act-1007936.pdf?src-supplier=Digikey; ComponentLink5URL: https://datasheet.ciiva.com/7649/1833202-7649181.pdf?src-supplier=Element14; ComponentLink5Description: https://datasheet.ciiva.com/7649/1833202-7649181.pdf?src-supplier=Element14; ComponentLink6URL: https://datasheet.ciiva.com/8498/e9711-act-8498104.pdf?src-supplier=Avnet; ComponentLink6Description: https://datasheet.ciiva.com/8498/e9711-act-8498104.pdf?src-supplier=Avnet; ComponentLink7URL: https://datasheet.ciiva.com/16390/e9711-act-16390646.pdf?src-supplier=Future+Electronics; ComponentLink7Description: https://datasheet.ciiva.com/16390/e9711-act-16390646.pdf?src-supplier=Future+Electronics; ComponentLink8URL: https://datasheet.ciiva.com/31839/15e9711-act-31839430.pdf?src-supplier=Onlinecomponents.com; ComponentLink8Description: https://datasheet.ciiva.com/31839/15e9711-act-31839430.pdf?src-supplier=Onlinecomponents.com; ComponentLink9URL: https://datasheet.ciiva.com/1007/e9711-act-1007935.pdf?src-supplier=Digikey; ComponentLink9Description: https://datasheet.ciiva.com/1007/e9711-act-1007935.pdf?src-supplier=Digikey; ComponentLink10URL: https://datasheet.ciiva.com/1007/e9711-act-1007934.pdf?src-supplier=Digikey; ComponentLink10Description: https://datasheet.ciiva.com/1007/e9711-act-1007934.pdf?src-supplier=Digikey; LCSC Part Number: C88056
footprint ACT45B-101-2P-TL003
pins: 1, 2, 3, 4

## ACT45B-510-2P-TL003
designator L?
CMC 51UH 200MA 2LN 2.8KOHM SMD; Manufacturer: TDK; Manufacturer Part Number: ACT45B-510-2P-TL003; Impedance: 2.8kR; Voltage Rating (DC): 50V; Number of Lines: 2; Tolerance: 50%; DC Resistance (DCR): 1R; Test Frequency: 10MHz; Insulation Resistance: 10MR; Item Type: Common Mode Filter; Supplier: Arrow Electronics; Supplier Part Number: ACT45B-510-2P-TL003; RoHS: Yes; Category: Fixed Inductors; Stock: 390000; Pricing: 2500=0.8915, 5000=0.8612, 10000=0.8526 (USD); Mounting Technology: Surface Mount; Case/Package: 1812; Pins: 4; Case Code (Imperial): 1812; Min Operating Temperature: -40°C; Max Operating Temperature: 150°C; Packaging: Tape and Reel; Value: 51uH; Current Rating: 200mA; Package Quantity: 2000; Voltage Rating: 50V; Max DC Current: 200mA; Termination: SMD/SMT; DC Current: 200mA; Series: ACT; DC Resistance-Max: 1R; Max Current Rating: 200mA; Length: 4.5mm; Width: 3.2mm; Height: 3mm; Depth: 3.4mm; Ratings: AEC-Q200; Radiation Hardening: No; Reach SVHC Compliant: No; Military Standard: Not; RoHS Compliant: Yes; Lead Free: 5697LeadFree; ComponentLink1URL: https://datasheet.ciiva.com/22726/1649098-22726290.pdf?src-supplier=Element14; ComponentLink1Description: https://datasheet.ciiva.com/22726/1649098-22726290.pdf?src-supplier=Element14; ComponentLink2URL: https://datasheet.ciiva.com/1007/e9711-act-1007931.pdf?src-supplier=Digikey; ComponentLink2Description: https://datasheet.ciiva.com/1007/e9711-act-1007931.pdf?src-supplier=Digikey; ComponentLink3URL: https://datasheet.ciiva.com/1007/e9711-act-1007933.pdf?src-supplier=Digikey; ComponentLink3Description: https://datasheet.ciiva.com/1007/e9711-act-1007933.pdf?src-supplier=Digikey; ComponentLink4URL: https://datasheet.ciiva.com/8498/e9711-act-8498633.pdf?src-supplier=Avnet; ComponentLink4Description: https://datasheet.ciiva.com/8498/e9711-act-8498633.pdf?src-supplier=Avnet; ComponentLink5URL: https://datasheet.ciiva.com/7649/1833202-7649183.pdf?src-supplier=Element14; ComponentLink5Description: https://datasheet.ciiva.com/7649/1833202-7649183.pdf?src-supplier=Element14; ComponentLink6URL: https://datasheet.ciiva.com/1007/e9711-act-1007932.pdf?src-supplier=Digikey; ComponentLink6Description: https://datasheet.ciiva.com/1007/e9711-act-1007932.pdf?src-supplier=Digikey; ComponentLink7URL: https://datasheet.ciiva.com/15191/getdatasheetpartid-349822-15191803.pdf?src-supplier=Verical; ComponentLink7Description: https://datasheet.ciiva.com/15191/getdatasheetpartid-349822-15191803.pdf?src-supplier=Verical; LCSC Part Number: C76584
footprint ACT45B-510-2P-TL003
pins: 1, 2, 3, 4

## AHW1005C-56NJTF
designator L?, comment 56nH
100mA 56nH ±5% 0.97Ω 0402 Inductors (SMD) ROHS; Manufacturer: APV; Manufacturer Part Number: AHW1005C-56NJTF; Package: 0402; LCSC Part Number: C6807990; Item Type: Inductor; ComponentLink1Description: LCSC; ComponentLink1URL: https://www.lcsc.com/product-detail/Inductors-SMD_APV-AHW1005C-56NJTF_C6807990.html
footprint IND-0402
pins: 1, 2

## APH0650T330M
designator L?
1.88A 33uH Integrated molded inductor ±20% 2.49A SMD,7x6.6mm Power Inductors ROHS; Manufacturer: APV; Manufacturer Part Number: APH0650T330M; Package: SMD,7x6.6mm; LCSC Part Number: C5349692; Item Type: Inductor
footprint APH0650T330M
pins: 1, 2

## B1617S
designator T?
Single port 1:1 100M POE SMD-16P,12.7x7mm Pulse Transformers(LAN) ROHS; Manufacturer: CND-tek; Manufacturer Part Number: B1617S; Package: SMD-16P,12.7x7mm; LCSC Part Number: C507597; Item Type: Transformer; ComponentLink1Description: LCSC; ComponentLink1URL: https://jlcpcb.com/partdetail/cndtek-B1617S/C507597
footprint B1617S
pins: 1 TD+, 2 TCT, 3 TD-, 4, 5, 6 RD+, 7 RCT, 8 RD-, 9 RX-, 10 RXCT, 11 RX+, 12, 13, 14 TX-, 15 TXCT, 16 TX+

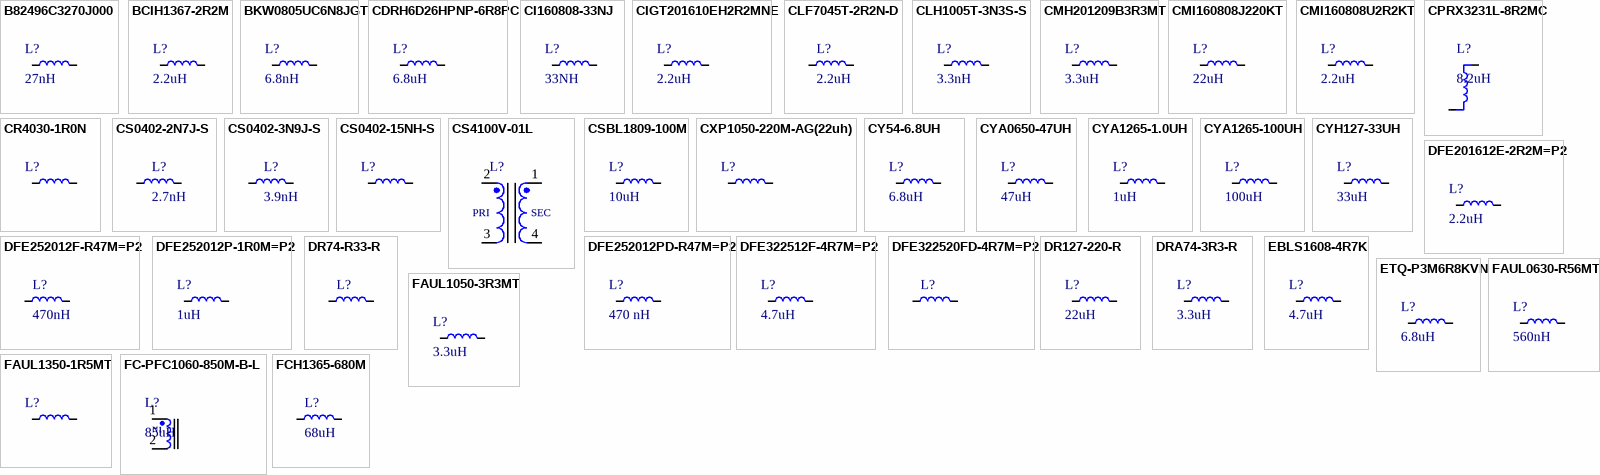
[diagram p1: symbols B82496C3270J000 to FCH1365-680M]

## B82496C3270J000
designator L?, comment 27nH
FIXED IND 27NH 360MA 550MOHM SMD; Manufacturer: TDK EPCOS; Manufacturer Part Number: B82496C3270J000; Item Type: Inductor; Supplier 1: Digikey; RoHS: Yes; Stock 1: 40469; Pricing 1: 1=0.36, 10=0.291, 25=0.2688, 50=0.2464, 100=0.2172, 250=0.21052, 500=0.18814, 1000=0.1523 (USD); ComponentLink1URL: https://datasheet.ciiva.com/22704/78400-22704383.pdf?src-supplier=Element14; ComponentLink1Description: https://datasheet.ciiva.com/22704/78400-22704383.pdf?src-supplier=Element14; ComponentLink2URL: https://datasheet.ciiva.com/22684/78400-22684183.pdf?src-supplier=Element14; ComponentLink2Description: https://datasheet.ciiva.com/22684/78400-22684183.pdf?src-supplier=Element14; Supplier Part Number 1: 495-2029-1-ND; LCSC Part Number: C2046375
footprint IND-0603 (1608 Metric) (0.063" L x 0.032" W (1.60mm x 0.80mm))
pins: 1, 2

## BCIH1367-2R2M
designator L?, comment 2.2uH
22A 2.2uH ±20% SMD Power Inductors ROHS; Manufacturer: BC(Bao Cheng Elec); Manufacturer Part Number: BCIH1367-2R2M; Package: SMD; LCSC Part Number: C237973; Item Type: Inductor; ComponentLink1Description: LCSC; ComponentLink1URL: https://www.lcsc.com/product-detail/Power-Inductors_BC-Bao-Cheng-Elec-BCIH1367-2R2M_C237973.html
footprint BCIH1367-2R2M
pins: 1, 2

## BKW0805UC6N8JGT
designator L?, comment 6.8nH
600mA 6.8nH ±5% 110mΩ 0805 Inductors (SMD) ROHS; Manufacturer: FH-BK; Manufacturer Part Number: BKW0805UC6N8JGT; Package: 0805; LCSC Part Number: C98541; Item Type: Inductor; ComponentLink1Description: LCSC; ComponentLink1URL: https://www.lcsc.com/product-detail/Inductors-SMD_FH-BK-Guangdong-Fenghua-Bangke-Elec-BKW0805UC6N8JGT_C98541.html
footprint Ind-0805 (Inductor 0805)
pins: 1, 2

## CDRH6D26HPNP-6R8PC
designator L?, comment 6.8uH
6.8 µH Shielded Drum Core, Wirewound Inductor 2.3 A 64.4mOhm Max Nonstandard; Manufacturer: Sumida; Manufacturer Part Number: CDRH6D26HPNP-6R8PC; Supplier: DigiKey; LCSC Part Number: C212266; RoHS: Yes; Item Type: Inductor
footprint CDRH6D26HPNP-6R8PC
pins: 1, 2

## CI160808-33NJ
designator L?, comment 33NH
FIXED IND 33NH 300MA 650MOHM SMD; Manufacturer: Bourns; Manufacturer Part Number: CI160808-33NJ; Item Type: Inductors; Supplier: Arrow Electronics; RoHS: Yes; Stock: 2530; Pricing: 1=0.0222, 10=0.022, 25=0.0218, 100=0.0216, 250=0.0213, 500=0.0211, 1000=0.0209 (USD); ComponentLink1URL: https://datasheet.ciiva.com/8516/ci160808-8516587.pdf?src-supplier=Avnet; ComponentLink1Description: https://datasheet.ciiva.com/8516/ci160808-8516587.pdf?src-supplier=Avnet; ComponentLink2URL: https://datasheet.ciiva.com/3083/ci160808-3083028.pdf?src-supplier=Avnet; ComponentLink2Description: https://datasheet.ciiva.com/3083/ci160808-3083028.pdf?src-supplier=Avnet
footprint IND-0603 (1608 Metric) (0.063" L x 0.032" W (1.60mm x 0.80mm))
pins: 1, 2

## CIGT201610EH2R2MNE
designator L?, comment 2.2uH
FIXED IND 2.2UH 2.5A 87MOHM SMD; Manufacturer: Samsung; Manufacturer Part Number: CIGT201610EH2R2MNE; Item Type: Inductor; Core Material: Metal,Composite; Tolerance: 20%; Saturation Current: 2.9A; Shielding: Unshielded; DC Resistance (DCR): 87mR; Test Frequency: 1MHz; Supplier: Arrow Electronics; Supplier Part Number: CIGT201610EH2R2MNE; RoHS: Yes; Stock: 6000; Pricing: 60000=0.0753, 99000=0.0745 (USD); Mounting Technology: Surface Mount; Case/Package: 0806; Case Code (Imperial): 0806; Case Code (Metric): 2016; Min Operating Temperature: -40°C; Max Operating Temperature: 125°C; Packaging: Cut Tape; Value: 2.2uH; Series: CIGT; RoHS Compliant: Yes; ComponentLink1URL: http://www.samsungsem.com/kr/support/product-search/inductor/CIGT201610EH2R2MNE.jsp?src-supplier=Digikey; ComponentLink1Description: http://www.samsungsem.com/kr/support/product-search/inductor/CIGT201610EH2R2MNE.jsp?src-supplier=Digikey
footprint IND-0806
pins: 1, 2

## CLF7045T-2R2N-D
designator L?, comment 2.2uH
FIXED IND 2.2UH 4.3A 18.98 MOHM; Manufacturer: TDK; Manufacturer Part Number: CLF7045T-2R2N-D; Item Type: Inductor; Supplier: Arrow Electronics; Supplier Part Number: CLF7045T-2R2N-D; RoHS: Yes; Category: Fixed Inductors; Stock: 1021; Pricing: 1=0.5089, 10=0.502, 25=0.4797, 100=0.467, 250=0.4651, 500=0.4631, 1000=0.4612 (USD); ComponentLink1URL: https://datasheet.ciiva.com/30489/0900766b8129d3e9-30489231.pdf?src-supplier=Rs; ComponentLink1Description: https://datasheet.ciiva.com/30489/0900766b8129d3e9-30489231.pdf?src-supplier=Rs; ComponentLink2URL: https://datasheet.ciiva.com/15026/e531-clf-d-15026965.pdf?src-supplier=Digikey; ComponentLink2Description: https://datasheet.ciiva.com/15026/e531-clf-d-15026965.pdf?src-supplier=Digikey; ComponentLink3URL: https://datasheet.ciiva.com/15026/e531-clf-d-15026966.pdf?src-supplier=Digikey; ComponentLink3Description: https://datasheet.ciiva.com/15026/e531-clf-d-15026966.pdf?src-supplier=Digikey; ComponentLink4URL: https://datasheet.ciiva.com/15026/e531-clf-d-15026967.pdf?src-supplier=Digikey; ComponentLink4Description: https://datasheet.ciiva.com/15026/e531-clf-d-15026967.pdf?src-supplier=Digikey; LCSC Part Number: C474321
footprint CLF7045T-2R2N-D
pins: 1, 2

## CLH1005T-3N3S-S
designator L?, comment 3.3nH
400mA 3.3nH 150mΩ 0402 Inductors (SMD) ROHS; Manufacturer: Chilisin Elec; Manufacturer Part Number: CLH1005T-3N3S-S; Package: 0402; LCSC Part Number: C108256; Item Type: Inductor; ComponentLink1Description: LCSC; ComponentLink1URL: https://www.lcsc.com/product-detail/Inductors-SMD_Chilisin-Elec-CLH1005T-3N3S-S_C108256.html
footprint IND-0402
pins: 1, 2

## CMH201209B3R3MT
designator L?, comment 3.3uH
800mA 3.3uH ±20% 0805 Power Inductors ROHS; Manufacturer: FH (Guangdong Fenghua Advanced Tech); Manufacturer Part Number: CMH201209B3R3MT; Package: 0805; LCSC Part Number: C394958; Item Type: Inductor; ComponentLink1Description: LCSC; ComponentLink1URL: https://www.lcsc.com/product-detail/Power-Inductors_FH-Guangdong-Fenghua-Advanced-Tech-CMH201209B3R3MT_C394958.html
footprint Ind-0805 (Inductor 0805)
pins: 1, 2

## CMI160808J220KT
designator L?, comment 22uH
22uH ±10% 0603 Inductors (SMD) ROHS; Manufacturer: FH; Manufacturer Part Number: CMI160808J220KT; LCSC Part Number: C361669; ComponentLink1Description: LCSC; ComponentLink1URL: https://lcsc.com/product-detail/Inductors-SMD_FH-Guangdong-Fenghua-Advanced-Tech-CMI160808J220KT_C361669.html
footprint IND-0603 (1608 Metric) (0.063" L x 0.032" W (1.60mm x 0.80mm))
pins: 1, 2